# Altium schematic symbol library LCM.SchLib: 24 symbols
Pins are listed as number, name and electrical type; pins without a type are passive.

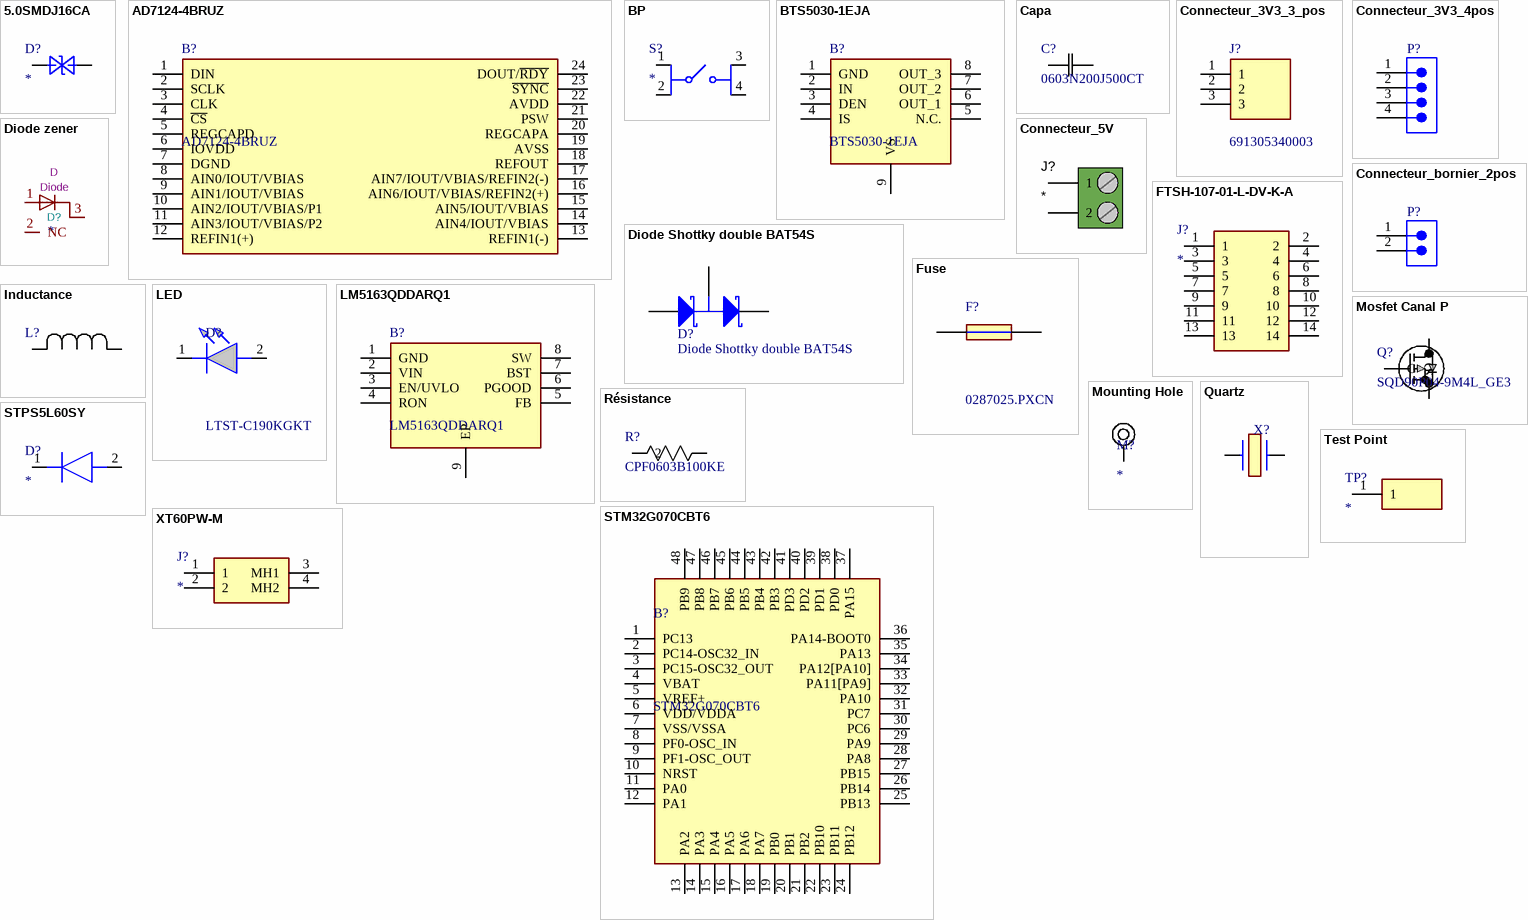
[diagram p0: symbols 5.0SMDJ16CA to XT60PW-M]

## 5.0SMDJ16CA
designator D?
26V Clamp 193A Ipp Tvs Diode Surface Mount DO-214AB (SMCJ); MF: Littelfuse; MP: 5.0SMDJ16CA; SnapEDA_Link: https://www.snapeda.com/parts/5.0SMDJ16CA/Littelfuse/view-part/?ref=snap; Package: DO-214 Littelfuse Inc.; Value: *; Check_prices: https://www.snapeda.com/parts/5.0SMDJ16CA/Littelfuse/view-part/?ref=eda
footprint 5.0SMDJ16CA
pins: 1, 2

## AD7124-4BRUZ
designator B?
4-Channel, Low Noise, Low Power, 24-Bit, Sigma-Delta ADC with PGA and Reference; Manufacturer_Name: Analog Devices; Geometry.Height: 1.2mm; Mouser Part Number: 584-AD7124-4BRUZ; Mouser Price/Stock: https://www.mouser.co.uk/ProductDetail/Analog-Devices/AD7124-4BRUZ?qs=8Sj0zgMuDMVqCrsELALuFg%3D%3D; Manufacturer_Part_Number: AD7124-4BRUZ; Datasheet Link: http://www.analog.com/media/en/technical-documentation/data-sheets/AD7124-4.pdf
footprint AD7124-4BRUZ
pins: 1 DIN, 2 SCLK, 3 CLK, 4 ~{CS}, 5 REGCAPD, 6 IOVDD, 7 DGND, 8 AIN0/IOUT/VBIAS, 9 AIN1/IOUT/VBIAS, 10 AIN2/IOUT/VBIAS/P1, 11 AIN3/IOUT/VBIAS/P2, 12 REFIN1(+), 13 REFIN1(-), 14 AIN4/IOUT/VBIAS, 15 AIN5/IOUT/VBIAS, 16 AIN6/IOUT/VBIAS/REFIN2(+), 17 AIN7/IOUT/VBIAS/REFIN2(-), 18 REFOUT, 19 AVSS, 20 REGCAPA, 21 PSW, 22 AVDD, 23 ~{SYNC}, 24 DOUT/~{RDY}

## BP
designator S?
Switch (4-Pin Push); Manufacturer_Name: Same Sky; Manufacturer_Part_Number: TS40-66-33-BK-260-SMT-TR; Datasheet Link: https://www.sameskydevices.com/product/resource/ts40.pdf; Height: 3.4mm
footprint Bouton Poussoir (TS406633BK260SMTTR)
pins: 1 COM_1, 2 COM_2, 3 NO_1, 4 NO_2

## BTS5030-1EJA
designator B?
Power Switch ICs - Power Distribution Profet Smart High Side Switch 28V 36A; Manufacturer_Name: Infineon; Geometry.Height: 1.7mm; Mouser Part Number: 726-BTS5030-1EJA; Mouser Price/Stock: https://www.mouser.co.uk/ProductDetail/Infineon-Technologies/BTS5030-1EJA?qs=%252BWnEOWq1JvHis1YUcAvI1A%3D%3D; Manufacturer_Part_Number: BTS5030-1EJA; Datasheet Link: https://ms.componentsearchengine.com/Datasheets/1/BTS5030-1EJA.pdf
footprint BTS5030-1EJA
pins: 1 GND, 2 IN, 3 DEN, 4 IS, 5 N.C., 6 OUT_1, 7 OUT_2, 8 OUT_3, 9 VS (power)

## Capa
designator C?, comment 0603N200J500CT
No Description Available; Manufacturer_Name: Walsin; Copyright: Copyright (C) 2026 Ultra Librarian. All rights reserved.; Manufacturer_Part_Number: 0603N200J500CT
footprint CAP_0603_WAL-L
footprint CGA6N3X7R2A225K230AB (Condensateurs céramique multicouches MLCC - CMS CGA 1210 100V 2.2uF X7R 10% AEC-Q200)
footprint KGM21AR71A106KL (Capa 10µF, 10VDC, X7R,)
pins: 1, 2

## Connecteur_3V3_3_pos
designator J?, comment 691305340003
WR-TBL Terminal block - PCB Header - THT Serie 3053 - 3,81mm pitch - Monoblock THT - Green - Horizontal PCB Header with Plastic ears 03p; Manufacturer_Name: Wurth Elektronik; Geometry.Height: 7.5mm; Mouser Part Number: 710-691305340003; Mouser Price/Stock: https://www.mouser.co.uk/ProductDetail/Wurth-Elektronik/691305340003?qs=lBTPRtX1sU90CHy4WHMybg%3D%3D; Manufacturer_Part_Number: 691305340003; Datasheet Link: https://www.digikey.com/en/products/detail/w%C3%BCrth-elektronik/691305340003/6644174
footprint Connecteur_3V3_3pos
pins: 1, 2, 3

## Connecteur_3V3_4pos
designator P?, comment 691305340004  (value not drawn)
WR-TBL Series 3053 Horizontal PCB Header, THT, pitch 3.81mm, 04p; Manufacturer: Wurth Elektronik; Modularity: No; Rated Current: 12A; Working Voltage: 300V (AC); Manufacturer Part Number: 691305340004; Product Series: WR-TBL; ComponentLink1Description: Website Link; ComponentLink1URL: https://www.we-online.com; ComponentLink2Description: Datasheet Link; ComponentLink2URL: https://www.we-online.com/components/products/datasheet/691305340004; Mount: Through Hole; Operating Temperature Min: -40degC; Operating Temperature Max: 105degC; Packaging: Box; Application: Pluggable; Number of Pins: 4; Number of Rows: 1; Orientation: Horizontal; Lead Pitch: 3.81mm
footprint Connecteur_3V3_4pos (Horizontal PCB Header with Plastic Latch, pitch 3.81mm, 04p)
pins: 1, 2, 3, 4

## Connecteur_5V
designator J?
footprint Connecteur_5V
footprint Connecteur_5V_Coude
pins: 1, 2

## Connecteur_bornier_2pos
designator P?, comment 691313510002  (value not drawn)
WR-TBL Series 313 Close Horizontal PCB Header, THT, pitch 5.08mm, 02p; Manufacturer: Wurth Elektronik; Modularity: No; Rated Current: 15A; Working Voltage: 300V (AC); Manufacturer Part Number: 691313510002; Product Series: WR-TBL; ComponentLink1Description: Website Link; ComponentLink1URL: https://www.we-online.com; ComponentLink2Description: Datasheet Link; ComponentLink2URL: https://www.we-online.com/components/products/datasheet/691313510002; Mount: Through Hole; Operating Temperature Min: -40degC; Operating Temperature Max: 105degC; Packaging: Box; Application: Pluggable; Number of Pins: 2; Number of Rows: 1; Orientation: Horizontal; Lead Pitch: 5.08mm
footprint Connecteur_male_2pos_5.08mmpitch (5,08mm - PCB Headers - Horizontal - Closed ends - 02p)
pins: 1, 2

## Diode Shottky double BAT54S
designator D?
DIODE SCHOTTKY DOUBLE; Manufacturer: ZETEX; ComponentLink1URL: http://www.farnell.com/datasheets/27632.pdf; ComponentLink1Description: http://www.farnell.com/datasheets/27632.pdf; Supplier: Farnell; RoHS: YES; Supplier Part Number: 9526510; Pricing: 5=0,32, 25=0,26, 100=0,21, 1000=0,17 (EUR); Manufacturer Part Number: BAT54S
footprint BAT54S (SOT23, 3-Leads, Body 2.9x1.3mm, Pitch 0.95mm, Lead Span 2.5mm, IPC Medium Density)
pins: 1 A, 2 K, 3 C

## Diode zener
designator D?  value Diode  Reference: D
Diode zener 10V; ki_keywords: Doide NC pin; ki_description: Diode with NC pin; Datasheet: https://diotec.com/de/produktliste/D.html
footprint Diode zener 10V (SOT23, 3-Leads, IPC Medium Density, TO-236)
footprint BZX84B3V3-7-F
pins: 1 A, 2 NC, 3 K

## FTSH-107-01-L-DV-K-A
designator J?
Connecteur de programmation; Manufacturer_Name: SAMTEC; Manufacturer_Part_Number: FTSH-107-01-L-DV-K-A; Datasheet Link: http://suddendocs.samtec.com/prints/ftsh-1xx-xx-xxx-dv-xxx-xxx-mkt.pdf; Mouser Part Number: 200-FTSH10701LDVKA; Mouser Price/Stock: https://www.mouser.co.uk/ProductDetail/Samtec/FTSH-107-01-L-DV-K-A?qs=PB6%2FjmICvI3xEHFou4PhNg%3D%3D; Arrow Part Number: FTSH-107-01-L-DV-K-A; Arrow Price/Stock: https://www.arrow.com/en/products/ftsh-107-01-l-dv-k-a/samtec.html?utm_currency=USD&region=nac
footprint FTSH-107-XX-YYY-DV-K-A
pins: 1, 2, 3, 4, 5, 6, 7, 8, 9, 10, 11, 12, 13, 14

## Fuse
designator F?, comment 0287025.PXCN
Clear ATOF F Fuse 25A 32V; Manufacturer_Name: LITTELFUSE; Geometry.Height: 12.3mm; Mouser Part Number: 576-0287025.PXCN; Mouser Price/Stock: https://www.mouser.co.uk/ProductDetail/Littelfuse/0287025.PXCN?qs=Vv6sT79n3zTQ3ExP8aVIIA%3D%3D; Manufacturer_Part_Number: 0287025.PXCN; Datasheet Link: https://www.littelfuse.com/~/media/automotive/datasheets/fuses/passenger-car-and-commercial-vehicle/blade-fuses/littelfuse_atof_datasheet.pdf
footprint Fuse 25A
footprint Porte Fusible
pins: 1, 2

## Inductance
designator L?
Description; Manufacturer_Name: Sumida; Manufacturer_Part_Number: CDRH5D28NP-100NC; Copyright: Copyright (C) 2025 Ultra Librarian. All rights reserved.
footprint CDRH5D28NP-390NC (Inductance, 39µH, 700mA)
pins: 1, 2

## LED
designator D?, comment LTST-C190KGKT
Lite-On LTST-C190KGKT, 571 nm Green LED, 1608 (0603) SMD package; Geometry.Height: 0.8mm; Mouser Part Number: 859-LTST-C190KGKT; Mouser Price/Stock: https://www.mouser.co.uk/ProductDetail/Lite-On/LTST-C190KGKT?qs=205qCy6M2Q%252BAdcgwUZktqw%3D%3D; Manufacturer_Name: Lite-On; Manufacturer_Part_Number: LTST-C190KGKT; Datasheet Link: *
footprint LEDC1608X80N (LTST-C190KGKT)
pins: 1 K, 2 A

## LM5163QDDARQ1
designator B?
100-V input, 0.5-A synchronous buck DC/DC converter with ultra-low IQ; Manufacturer_Name: Texas Instruments; Geometry.Height: 1.7mm; Mouser Part Number: 595-LM5163QDDARQ1; Mouser Price/Stock: https://www.mouser.co.uk/ProductDetail/Texas-Instruments/LM5163QDDARQ1?qs=mAH9sUMRCtv%252Bp97Xz%2FAX6Q%3D%3D; Manufacturer_Part_Number: LM5163QDDARQ1; Datasheet Link: http://www.ti.com/lit/gpn/LM5163-Q1
footprint BTS5030-1EJA
pins: 1 GND, 2 VIN, 3 EN/UVLO, 4 RON, 5 FB, 6 PGOOD, 7 BST, 8 SW, 9 EP

## Mosfet Canal P
designator Q?, comment SQD90P04-9M4L_GE3
P-CHANNEL 40-V (D-S) 175C MOSFET; Manufacturer_Name: Vishay; Type: Transistors; Copyright: Copyright (C) 2026 Ultra Librarian. All rights reserved.; Manufacturer_Part_Number: SQD90P04-9M4L_GE3; Datasheet: https://www.vishay.com/doc?66743
footprint Mosfet_Canal_P
pins: 1 G, 3 S, 4 D

## Mounting Hole
designator M?
footprint M3_HOLE
pins: 1

## Quartz
designator X?
Low Profile SMD Type Crystal Units; Manufacturer_Name: Vishay; Manufacturer_Part_Number: XT9M20HRR8M; Geometry.Height: 4.5mm; Mouser Part Number: 70-XT49MR-208MHZTR; Mouser Price/Stock: https://www.mouser.co.uk/ProductDetail/Vishay-Dale/XT9M20HRR8M?qs=n2tc7qt3lsa%252BUGKkvhaCdg%3D%3D; Datasheet Link: https://www.vishay.com/docs/35012/xt49m.pdf
footprint XT9M20HRR8M (Qartz Crystal 8MHz)
pins: 1, 2

## Résistance
designator R?, comment CPF0603B100KE
CPF 0603 100K 0.1% 25PPM 5K RL; Manufacturer_Name: TE Connectivity; Copyright: Copyright (C) 2026 Ultra Librarian. All rights reserved.; Manufacturer_Part_Number: CPF0603B100KE
footprint Resistance 0603
pins: 1, 2

## STM32G070CBT6
designator B?
ARM Microcontrollers - MCU Arm Cortex -M0+ 32-bit MCU, 128 KB Flash, 36 KB RAM, 4x USART, timers, ADC, comm. I/Fs, 2.0-3.6V; Manufacturer_Name: STMicroelectronics; Geometry.Height: 1.6mm; Mouser Part Number: 511-STM32G070CBT6; Mouser Price/Stock: https://www.mouser.co.uk/ProductDetail/STMicroelectronics/STM32G070CBT6?qs=l7cgNqFNU1gFKn1as7Ms0g%3D%3D; Manufacturer_Part_Number: STM32G070CBT6; Datasheet Link: https://www.st.com/resource/en/datasheet/stm32g070cb.pdf
footprint STM32G070CBT6
pins: 1 PC13, 2 PC14-OSC32_IN, 3 PC15-OSC32_OUT, 4 VBAT, 5 VREF+, 6 VDD/VDDA, 7 VSS/VSSA, 8 PF0-OSC_IN, 9 PF1-OSC_OUT, 10 NRST, 11 PA0, 12 PA1, 13 PA2, 14 PA3, 15 PA4, 16 PA5, 17 PA6, 18 PA7, 19 PB0, 20 PB1, 21 PB2, 22 PB10, 23 PB11, 24 PB12, 25 PB13, 26 PB14, 27 PB15, 28 PA8, 29 PA9, 30 PC6, 31 PC7, 32 PA10, 33 PA11[PA9], 34 PA12[PA10], 35 PA13, 36 PA14-BOOT0, 37 PA15, 38 PD0, 39 PD1, 40 PD2, 41 PD3, 42 PB3, 43 PB4, 44 PB5, 45 PB6, 46 PB7, 47 PB8, 48 PB9

## STPS5L60SY
designator D?
Diode Schotky; Manufacturer_Name: STMicroelectronics; Manufacturer_Part_Number: STPS5L60SY; Datasheet Link: https://www.st.com/resource/en/datasheet/stps5l60-y.pdf; Height: 2.65mm; Mouser Part Number: 511-STPS5L60SY; Mouser Price/Stock: https://www.mouser.co.uk/ProductDetail/STMicroelectronics/STPS5L60SY?qs=gNDSiZmRJS8tIEDJe9Kcyw%3D%3D; Arrow Part Number: STPS5L60SY; Arrow Price/Stock: https://www.arrow.com/en/products/stps5l60sy/stmicroelectronics.html?utm_currency=USD&region=nac
footprint STPS5L60SY (Diode Schotky)
pins: 1 K, 2 A

## Test Point
designator TP?
Test Point Keystone Electronics 5001; Manufacturer_Part_Number: 5001; Description: KEYSTONE - 5001 - TEST POINT; Datasheet Link: http://www.keyelco.com/product-pdf.cfm?p=1310; Manufacturer_Name: Keystone Electronics; Mouser Part Number: 534-5001; Mouser Price/Stock: https://www.mouser.co.uk/ProductDetail/Keystone-Electronics/5001?qs=q0tsjPZWdm%2FW0vdr%2FwowKg%3D%3D; Arrow Part Number: 5001; Arrow Price/Stock: https://www.arrow.com/en/products/5001/keystone-electronics.html?utm_currency=USD&region=europe
footprint Test Point (Keystone Electronics 5001)
pins: 1

## XT60PW-M
designator J?
Connector; Manufacturer_Name: Amass; Manufacturer_Part_Number: XT60PW-M; Datasheet Link: https://www.tme.eu/Document/b13629717d44ae038681dba08d18c0b6/XT60PW-M.pdf; Height: 8.4mm
footprint XT60PWM
pins: 1, 2, 3 MH1, 4 MH2